# Altium schematic symbol library Inductor.SchLib: 326 symbols (part 3 of 7)
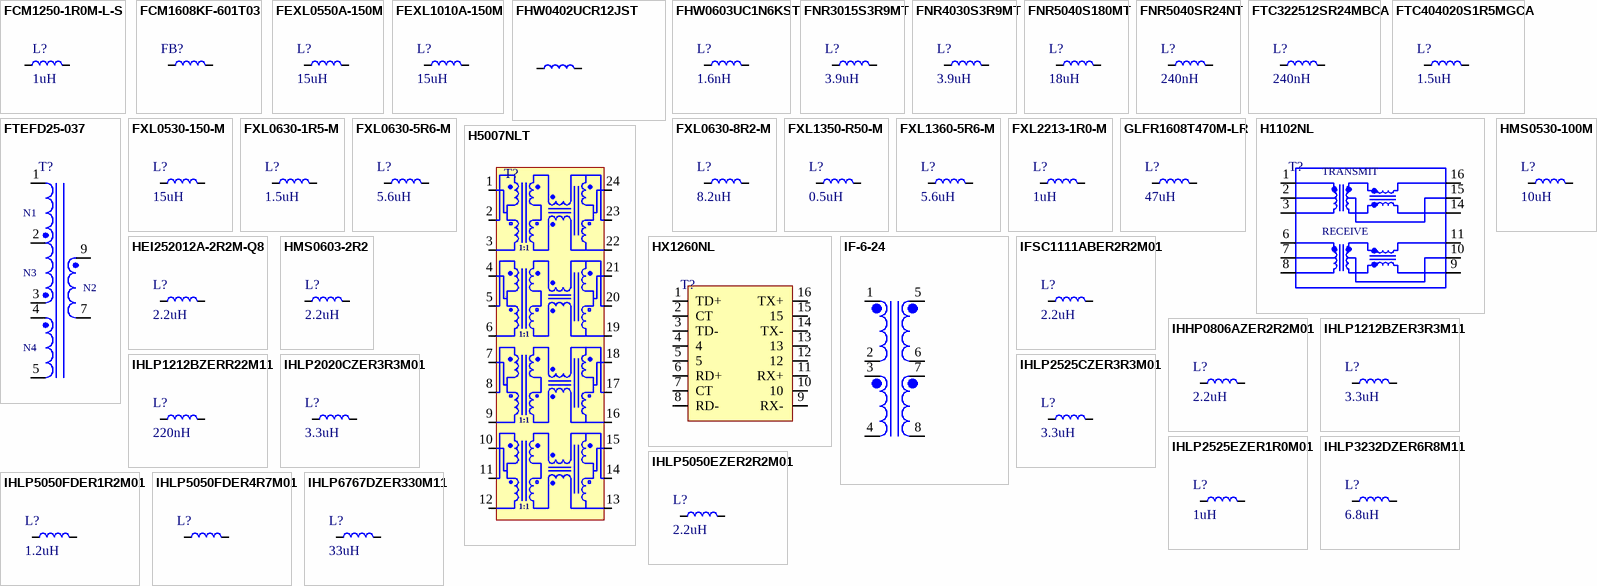
[diagram p10: symbols FCM1250-1R0M-L-S to IHLP6767DZER330M11]

## IHLP2020CZER3R3M01
designator L?, comment 3.3uH
FIXED IND 3.3UH 5A 54.7 MOHM SMD; Manufacturer: Vishay Dale; Manufacturer Part Number: IHLP2020CZER3R3M01; Item Type: Inductor; Supplier: Mouser; Supplier Part Number: 70-IHLP2020CZER3R3M0; RoHS: Yes; Category: Fixed Inductors; Stock: 17321; Pricing: 1=1.24, 10=0.947, 50=0.947, 100=0.796, 1000=0.606, 10000=0.497 (USD); ComponentLink1URL: https://datasheet.ciiva.com/16390/lp20cz01-16390407.pdf?src-supplier=Future+Electronics; ComponentLink1Description: https://datasheet.ciiva.com/16390/lp20cz01-16390407.pdf?src-supplier=Future+Electronics; ComponentLink2URL: https://datasheet.ciiva.com/1051/lp20cz01-1051660.pdf?src-supplier=Digi-Key; ComponentLink2Description: https://datasheet.ciiva.com/1051/lp20cz01-1051660.pdf?src-supplier=Digi-Key; ComponentLink3URL: https://datasheet.ciiva.com/1051/lp20cz01-1051661.pdf?src-supplier=Digi-Key; ComponentLink3Description: https://datasheet.ciiva.com/1051/lp20cz01-1051661.pdf?src-supplier=Digi-Key; ComponentLink4URL: https://datasheet.ciiva.com/1051/lp20cz01-1051662.pdf?src-supplier=Digi-Key; ComponentLink4Description: https://datasheet.ciiva.com/1051/lp20cz01-1051662.pdf?src-supplier=Digi-Key; ComponentLink5URL: https://datasheet.ciiva.com/8494/lp20cz01-8494984.pdf?src-supplier=Avnet; ComponentLink5Description: https://datasheet.ciiva.com/8494/lp20cz01-8494984.pdf?src-supplier=Avnet; LCSC Part Number: C553993
footprint IHLP2020CZER3R3M01
pins: 1, 2

## IHLP2525CZER3R3M01
designator L?, comment 3.3uH
6A 3.3uH ±20% 13.5A SMD,6.5x6.9mm Power Inductors ROHS; Manufacturer: Vishay Intertech; Manufacturer Part Number: IHLP2525CZER3R3M01; Package: SMD,6.5x6.9mm; LCSC Part Number: C506574; Item Type: Inductor; ComponentLink1Description: LCSC; ComponentLink1URL: https://www.lcsc.com/product-detail/Power-Inductors_Vishay-Intertech-IHLP2525CZER3R3M01_C506574.html
footprint IHLP2525CZER3R3M01
pins: 1, 2

## IHLP2525EZER1R0M01
designator L?, comment 1uH
FIXED IND 1UH 13A 6.5 MOHM SMD; Manufacturer: Vishay Dale; Manufacturer Part Number: IHLP2525EZER1R0M01; Core Material: Ferrite,Metal,Composite; Inductance Tolerance: 20%; Shielding: Shielded; Self Resonant Frequency: 1MHz; Saturation Current: 15A; DC Resistance (DCR): 6.5mR; Test Frequency: 100kHz; Item Type: Inductor; Supplier 1: Mouser; RoHS: Yes; Category: Fixed Inductors; Stock 1: 13861; Pricing 1: 1=1.91000, 10=1.63000, 50=1.63000, 100=1.27000, 1000=1.01000, 10000=0.97700 (USD); Mounting Technology: Surface Mount; Case/Package: 2525; Pins: 2525; Case Code (Metric): 6363; Case Code (Imperial): 2525; Contact Plating: Tin; Min Operating Temperature: -55°C; Max Operating Temperature: 125°C; Tolerance: 20%; Packaging: Tape and Reel; Package Quantity: 500; Value: 1uH; Current Rating: 13A; Max DC Current: 15A; Termination: SMD/SMT; RMS Current (Irms): 13A; Series: IHLP-2525EZ-01; Max Current Rating: 13A; Length: 6.86mm; Width: 6.47mm; Height: 5mm; Height - Seated (Max): 0.197inch; Depth: 6.72mm; Radiation Hardening: No; Military Standard: Not; Lead Free: Lead Free; RoHS Compliant: Yes; ComponentLink1URL: https://datasheet.ciiva.com/3866/ihlp25ez-3866198.pdf?src-supplier=Arrow+Electronics; ComponentLink1Description: https://datasheet.ciiva.com/3866/ihlp25ez-3866198.pdf?src-supplier=Arrow+Electronics; ComponentLink2URL: https://datasheet.ciiva.com/16367/ihlp2525ezer1r0m01-16367629.pdf?src-supplier=Future+Electronics; ComponentLink2Description: https://datasheet.ciiva.com/16367/ihlp2525ezer1r0m01-16367629.pdf?src-supplier=Future+Electronics; ComponentLink3URL: https://datasheet.ciiva.com/11798/0900766b8102c936-11798393.pdf?src-supplier=Rs; ComponentLink3Description: https://datasheet.ciiva.com/11798/0900766b8102c936-11798393.pdf?src-supplier=Rs; ComponentLink4URL: https://datasheet.ciiva.com/8017/425624-8017274.pdf?src-supplier=Element14; ComponentLink4Description: https://datasheet.ciiva.com/8017/425624-8017274.pdf?src-supplier=Element14; ComponentLink5URL: https://datasheet.ciiva.com/22694/425624-22694494.pdf?src-supplier=Element14; ComponentLink5Description: https://datasheet.ciiva.com/22694/425624-22694494.pdf?src-supplier=Element14; Supplier Part Number 1: 70-IHLP2525EZER1R0M1; LCSC Part Number: C845036
footprint IHLP2525EZER1R0M01
pins: 1, 2

## IHLP3232DZER6R8M11
designator L?, comment 6.8uH
FIXED IND 6.8UH 7A 33.4 MOHM SMD; Manufacturer: Vishay Dale; Manufacturer Part Number: IHLP3232DZER6R8M11; Item Type: Inductor; Core Material: Ferrite; Inductance Tolerance: 20%; Self Resonant Frequency: 13MHz; Shielding: Shielded; Saturation Current: 6.7A; DC Resistance (DCR): 33.4mR; Test Frequency: 100kHz; Supplier: Mouser; LCSC Part Number: C845060; RoHS: Yes; Stock: 8806; Pricing: 1=1.31, 10=0.984, 50=0.984, 100=0.752, 1000=0.557, 10000=0.521 (USD); Mounting Technology: Surface Mount; Case/Package: 3232; Pins: 2; Min Operating Temperature: -55°C; Max Operating Temperature: 125°C; Package Quantity: 500; Packaging: Tape and Reel; Tolerance: 20%; Current Rating: 7A; Value: 6.8uH; Max DC Current: 6.7A; Termination: SMD/SMT; RMS Current (Irms): 7A; Series: IHLP-3232DZ-11; Max Current Rating: 7A; Length: 0.34inch; Width: 0.322inch; Height: 4mm; Height - Seated (Max): 0.157inch; Depth: 8.94mm; Radiation Hardening: No; Military Standard: Not; Lead Free: Lead Free; RoHS Compliant: Yes; Reach SVHC Compliant: Unknown; ComponentLink1URL: https://datasheet.ciiva.com/5763/ihlp3232dz11-5763504.pdf?src-supplier=Farnell; ComponentLink1Description: https://datasheet.ciiva.com/5763/ihlp3232dz11-5763504.pdf?src-supplier=Farnell; ComponentLink2URL: https://datasheet.ciiva.com/1058/ihlp-3232dz-11-1058078.pdf?src-supplier=Digikey; ComponentLink2Description: https://datasheet.ciiva.com/1058/ihlp-3232dz-11-1058078.pdf?src-supplier=Digikey; ComponentLink3URL: https://datasheet.ciiva.com/1058/ihlp-3232dz-11-1058077.pdf?src-supplier=Digikey; ComponentLink3Description: https://datasheet.ciiva.com/1058/ihlp-3232dz-11-1058077.pdf?src-supplier=Digikey; ComponentLink4URL: https://datasheet.ciiva.com/1058/ihlp-3232dz-11-1058079.pdf?src-supplier=Digikey; ComponentLink4Description: https://datasheet.ciiva.com/1058/ihlp-3232dz-11-1058079.pdf?src-supplier=Digikey; ComponentLink5URL: https://datasheet.ciiva.com/8495/ihlp3232dz11-8495151.pdf?src-supplier=Avnet; ComponentLink5Description: https://datasheet.ciiva.com/8495/ihlp3232dz11-8495151.pdf?src-supplier=Avnet; ComponentLink6URL: https://datasheet.ciiva.com/8017/ihlp3232dz11-8017326.pdf?src-supplier=Element14; ComponentLink6Description: https://datasheet.ciiva.com/8017/ihlp3232dz11-8017326.pdf?src-supplier=Element14
footprint IHLP3232DZER6R8M11
pins: 1, 2

## IHLP5050EZER2R2M01
designator L?, comment 2.2uH
FIXED IND 2.2UH 20A 5.5 MOHM SMD; Manufacturer: Vishay Dale; Manufacturer Part Number: IHLP5050EZER2R2M01; Item Type: Inductors; Supplier: Future Electronics; LCSC Part Number: C2041476; RoHS: Yes; Stock: 500; Pricing: 250=0.935, 500=0.915, 1000=0.89, 1250=0.885, 3750=0.84 (USD); ComponentLink1URL: https://datasheet.ciiva.com/15160/getdatasheetpartid-74582-15160241.pdf?src-supplier=Verical; ComponentLink1Description: https://datasheet.ciiva.com/15160/getdatasheetpartid-74582-15160241.pdf?src-supplier=Verical; ComponentLink2URL: https://datasheet.ciiva.com/3082/ih50ez01-3082033.pdf?src-supplier=Avnet; ComponentLink2Description: https://datasheet.ciiva.com/3082/ih50ez01-3082033.pdf?src-supplier=Avnet; ComponentLink3URL: https://datasheet.ciiva.com/8017/425636-8017385.pdf?src-supplier=Element14; ComponentLink3Description: https://datasheet.ciiva.com/8017/425636-8017385.pdf?src-supplier=Element14
footprint IHLP5050EZER2R2M01
pins: 1, 2

## IHLP5050FDER1R2M01
designator L?, comment 1.2uH
FIXED IND 1.2UH 30A 2.5 MOHM SMD; Manufacturer: Vishay; Manufacturer Part Number: IHLP5050FDER1R2M01; Item Type: Inductor; Supplier: Digikey; LCSC Part Number: C2043370; RoHS: Yes; Stock: 366; Pricing: 1=2.26, 10=1.924, 25=1.7728, 50=1.5844, 100=1.3203 (USD); ComponentLink1URL: https://datasheet.ciiva.com/8017/54939-8017415.pdf?src-supplier=Element14; ComponentLink1Description: https://datasheet.ciiva.com/8017/54939-8017415.pdf?src-supplier=Element14; ComponentLink2URL: https://datasheet.ciiva.com/8496/lp50fd01-8496415.pdf?src-supplier=Avnet; ComponentLink2Description: https://datasheet.ciiva.com/8496/lp50fd01-8496415.pdf?src-supplier=Avnet
footprint IHLP5050FDER1R2M01
pins: 1, 2

## IHLP5050FDER4R7M01
designator L?
Inductor Power Shielded Wirewound 4.7uH 20% 100KHz Powdered Iron 13.5A 8.7mOhm DCR 5050 T/R; Manufacturer: Vishay Dale; Manufacturer Part Number: IHLP5050FDER4R7M01; Core Material: Metal,Composite,Ferrite; Self Resonant Frequency: 5MHz; Saturation Current: 32A; DC Resistance (DCR): 8.7mR; Supplier 1: Mouser; RoHS: Yes; Category: Fixed Inductors; Stock 1: 7872; Pricing 1: 1=2.51000, 10=1.81000, 50=1.81000, 100=1.38000, 1000=1.22000, 10000=1.14000 (USD); Mount: Surface Mount; Case/Package: 5050; Number of Pins: 5050; Contact Plating: Tin; Min Operating Temperature: -55°C; Max Operating Temperature: 125°C; Tolerance: 20%; Shielding: Shielded; Packaging: Tape and Reel; Package Quantity: 250; Inductance Tolerance: 20%; Inductance: 4.7uH; Current Rating: 13.5A; Max DC Current: 32A; Termination: SMD/SMT; Test Frequency: 100kHz; RMS Current (Irms): 13.5A; Series: IHLP-5050FD-01; Rated Current-Max: 13.5A; Length: 13.2mm; Width: 12.9mm; Height: 6.5mm; Height - Seated (Max): 0.256inch; Depth: 12.9mm; Radiation Hardening: No; Military Standard: Not; Lead Free: Lead Free; RoHS Compliant: Yes; ComponentLink1URL: https://datasheet.ciiva.com/11800/0900766b80926ea3-11800050.pdf?src-supplier=Rs; ComponentLink1Description: https://datasheet.ciiva.com/11800/0900766b80926ea3-11800050.pdf?src-supplier=Rs; ComponentLink2URL: https://datasheet.ciiva.com/3082/lp50fd01-3082044.pdf?src-supplier=Avnet; ComponentLink2Description: https://datasheet.ciiva.com/3082/lp50fd01-3082044.pdf?src-supplier=Avnet; ComponentLink3URL: https://datasheet.ciiva.com/8017/54939-8017420.pdf?src-supplier=Element14; ComponentLink3Description: https://datasheet.ciiva.com/8017/54939-8017420.pdf?src-supplier=Element14; LCSC Part Number: C845100; Item Type: Inductor; ComponentLink4Description: LCSC; ComponentLink4URL: https://www.lcsc.com/product-detail/Power-Inductors_Vishay-Intertech-IHLP5050FDER4R7M01_C845100.html
footprint IHLP5050FDER4R7M01.
pins: 1, 2

## IHLP6767DZER330M11
designator L?, comment 33uH
FIXED IND 33UH 6.5A 70.84MOHM SM; Manufacturer: Vishay Dale; Manufacturer Part Number: IHLP6767DZER330M11; Item Type: Fixed Inductors; Supplier: Digikey; LCSC Part Number: C1329381; RoHS: Yes; Stock: 3185; Pricing: 1=2.87, 10=2.362, 100=1.9423 (USD); ComponentLink1URL: https://datasheet.ciiva.com/1052/ihlp-6767dz-11-1052691.pdf?src-supplier=Digikey; ComponentLink1Description: https://datasheet.ciiva.com/1052/ihlp-6767dz-11-1052691.pdf?src-supplier=Digikey; ComponentLink2URL: https://datasheet.ciiva.com/1052/ihlp-6767dz-11-1052692.pdf?src-supplier=Digikey; ComponentLink2Description: https://datasheet.ciiva.com/1052/ihlp-6767dz-11-1052692.pdf?src-supplier=Digikey; ComponentLink3URL: https://datasheet.ciiva.com/1052/ihlp-6767dz-11-1052693.pdf?src-supplier=Digikey; ComponentLink3Description: https://datasheet.ciiva.com/1052/ihlp-6767dz-11-1052693.pdf?src-supplier=Digikey; ComponentLink4URL: https://datasheet.ciiva.com/8494/lp67dz11-8494894.pdf?src-supplier=Avnet; ComponentLink4Description: https://datasheet.ciiva.com/8494/lp67dz11-8494894.pdf?src-supplier=Avnet; ComponentLink5URL: https://datasheet.ciiva.com/7290/1836116-7290263.pdf?src-supplier=Newark; ComponentLink5Description: https://datasheet.ciiva.com/7290/1836116-7290263.pdf?src-supplier=Newark; ComponentLink6URL: https://datasheet.ciiva.com/8017/lp67dz11-8017653.pdf?src-supplier=Element14; ComponentLink6Description: https://datasheet.ciiva.com/8017/lp67dz11-8017653.pdf?src-supplier=Element14
footprint IHLP6767DZER330M11
pins: 1, 2

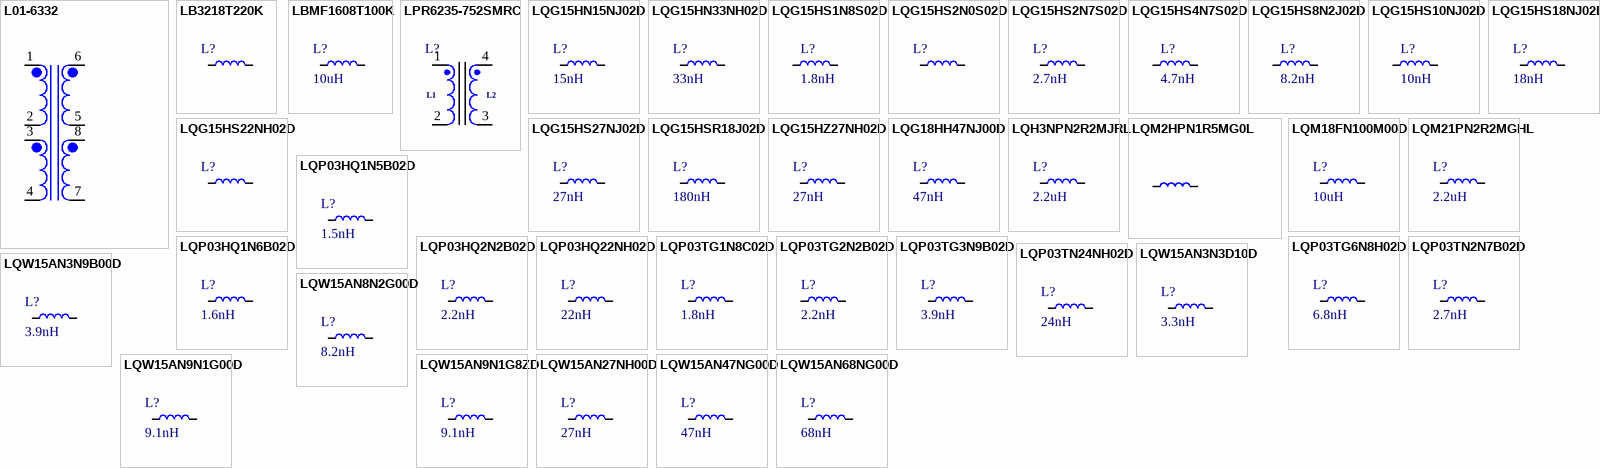
[diagram p3: symbols L01-6332 to LQW15AN68NG00D]

## L01-6332
designator T?
PWR XFMR TORO 7VA TH; Item Type: Transformer; Max Output current: 292mA; Primary Winding(s): Dual; Supplier: Digi-Key; Supplier Part Number: TE2240-ND; RoHS: Yes; Category: Transformers; Stock: 88; Pricing: 1=18.39, 24=16.22583, 48=14.06229, 96=13.52135 (USD); Mounting Technology: Through Hole; Weight: 0.384lb; Termination: PC Pin; Secondary Winding(s): Dual; Series: L01; Length: 49.7mm; Width: 49.7mm; Height - Seated (Max): 23.1mm; ComponentLink2URL: http://www.amgistoroids.com/assets/files/L01%20Series%2050%2060%20Hz%20PC%20Mount%20Toroidal%20Transformers.pdf?r=false&src-supplier=Digi-Key; ComponentLink2Description: http://www.amgistoroids.com/assets/files/L01%20Series%2050%2060%20Hz%20PC%20Mount%20Toroidal%20Transformers.pdf?r=false&src-supplier=Digi-Key
footprint L01-6332
pins: 1, 2, 3, 4, 5, 6, 7, 8

## LB3218T220K
designator L?
FIXED IND 22UH 255MA 490MOHM SMD; Manufacturer: Taiyo Yuden; Manufacturer Part Number: LB3218T220K; Core Material: Ferrite; Tolerance: 10%; Self Resonant Frequency: 19MHz; DC Resistance (DCR): 490mR; Test Frequency: 2.52MHz; Shielding: Unshielded; Item Type: Inductor; Supplier 1: Avnet; RoHS: Yes; Category: Fixed Inductors; Stock 1: 62; Pricing 1: 1=0.08700 (USD); Mounting Technology: Surface Mount; Case/Package: 1207; Pins: 2; Case Code (Metric): 3218; Case Code (Imperial): 1207; Min Operating Temperature: -40°C; Max Operating Temperature: 105°C; Packaging: Tape and Reel; Value: 22uH; Termination: SMD/SMT; Package Quantity: 2000; Current Rating: 255mA; Resistor Type: Wirewound; Max DC Current: 255mA; DC Current: 255mA; Series: LB; Length: 3.2mm; Width: 0.071inch; Height: 1.8mm; Height - Seated (Max): 0.08inch; Depth: 2mm; Radiation Hardening: No; RoHS Compliant: Yes; Military Standard: Not; Lead Free: Lead Free; Halogen Free: Halogen Free; ComponentLink1URL: https://datasheet.ciiva.com/1039/lb3218t220k-ss-1039280.pdf?src-supplier=Digi-Key; ComponentLink1Description: https://datasheet.ciiva.com/1039/lb3218t220k-ss-1039280.pdf?src-supplier=Digi-Key; ComponentLink2URL: https://datasheet.ciiva.com/8504/lb3218t220k-ss-8504739.pdf?src-supplier=Avnet; ComponentLink2Description: https://datasheet.ciiva.com/8504/lb3218t220k-ss-8504739.pdf?src-supplier=Avnet; ComponentLink3URL: https://datasheet.ciiva.com/26872/getdatasheetpartid-637493-26872233.pdf?src-supplier=Verical; ComponentLink3Description: https://datasheet.ciiva.com/26872/getdatasheetpartid-637493-26872233.pdf?src-supplier=Verical; ComponentLink4URL: https://datasheet.ciiva.com/15986/400lb3218t220k-15986619.pdf?src-supplier=Onlinecomponents.com; ComponentLink4Description: https://datasheet.ciiva.com/15986/400lb3218t220k-15986619.pdf?src-supplier=Onlinecomponents.com; ComponentLink5URL: https://datasheet.ciiva.com/25607/0900766b810b3abd-25607960.pdf?src-supplier=Rs; ComponentLink5Description: https://datasheet.ciiva.com/25607/0900766b810b3abd-25607960.pdf?src-supplier=Rs; Supplier Part Number 1: 24T3294; LCSC Part Number: C223400
footprint IND-3218
pins: 1, 2

## LBMF1608T100K
designator L?, comment 10uH
FIXED IND 10UH 80MA 360 MOHM SMD; Manufacturer: Taiyo Yuden; Manufacturer Part Number: LBMF1608T100K; Item Type: Inductors; Core Material: Ferrite; Self Resonant Frequency: 32MHz; Tolerance: 10%; Shielding: Unshielded; Test Frequency: 2.52MHz; DC Resistance (DCR): 360mR; ESR: 468mR; Supplier: Digikey; LCSC Part Number: C87216; RoHS: Yes; Stock: 2726337; Pricing: 1=0.13, 10=0.103, 25=0.0936, 50=0.0866, 100=0.0802, 250=0.07256, 500=0.06724, 1000=0.0623 (USD); Mounting Technology: Surface Mount; Case/Package: 0603; Weight: 7.1E-05oz; Case Code (Metric): 1608; Case Code (Imperial): 0603; Min Operating Temperature: -40°C; Max Operating Temperature: 105°C; Packaging: Tape and Reel; Value: 10uH; Max DC Current: 80mA; Termination: SMD/SMT; Inductance Tolerance: 10%; DC Current: 80mA; Series: LB, MF Type; RMS Current (Irms): 80mA; Length: 1.6mm; Width: 0.8mm; Height: 0.35mm; Lead Pitch: 0.7mm; Depth: 0.9mm; Radiation Hardening: No; Military Standard: Not; RoHS Compliant: Yes; Reach SVHC Compliant: Unknown; ComponentLink1URL: https://datasheet.ciiva.com/26872/getdatasheetpartid-637440-26872437.pdf?src-supplier=Verical; ComponentLink1Description: https://datasheet.ciiva.com/26872/getdatasheetpartid-637440-26872437.pdf?src-supplier=Verical; ComponentLink2URL: https://datasheet.ciiva.com/15986/610lbmf1608t100k-15986589.pdf?src-supplier=Onlinecomponents.com; ComponentLink2Description: https://datasheet.ciiva.com/15986/610lbmf1608t100k-15986589.pdf?src-supplier=Onlinecomponents.com; ComponentLink3URL: https://datasheet.ciiva.com/1040/lbmf1608t100k-ss-1040360.pdf?src-supplier=Digikey; ComponentLink3Description: https://datasheet.ciiva.com/1040/lbmf1608t100k-ss-1040360.pdf?src-supplier=Digikey; ComponentLink4URL: https://datasheet.ciiva.com/8504/lbmf1608t100k-ss-8504740.pdf?src-supplier=Avnet; ComponentLink4Description: https://datasheet.ciiva.com/8504/lbmf1608t100k-ss-8504740.pdf?src-supplier=Avnet; ComponentLink5URL: https://datasheet.ciiva.com/46395/1497259-46395174.pdf?src-supplier=Element14; ComponentLink5Description: https://datasheet.ciiva.com/46395/1497259-46395174.pdf?src-supplier=Element14
footprint IND-0603 (1608 Metric) (0.063" L x 0.032" W (1.60mm x 0.80mm))
pins: 1, 2

## LPR6235-752SMRC
designator L?
Coupled Inductors 7.5uH 75% 1.6A 316 Ohms; Manufacturer: Coilcraft; Manufacturer Part Number: LPR6235-752SMRC; Core Material: Ferrite; Supplier: Mouser; Supplier Part Number: 994-LPR6235-752SMRC; RoHS: Yes; Item Type: Inductors; Stock: 348; Pricing: 1=2.91, 10=2.48, 50=2.28, 100=1.7, 1000=1.56, 10000=1.25 (USD); Case/Package: 100; Min Operating Temperature: -40°C; Max Operating Temperature: 85°C; Packaging: Tape and Reel; Termination: SMD/SMT; Max DC Current: 1.6A; Package Quantity: 350; Inductance - Parallel: 7.5uH; Series: LPR6235; Length: 6mm; Width: 6mm; Height: 3.5mm; RoHS Compliant: Yes; ComponentLink1URL: http://www.mouser.com/ds/2/597/Coilcraft_lpr6235-491792.pdf?src-supplier=Mouser; ComponentLink1Description: http://www.mouser.com/ds/2/597/Coilcraft_lpr6235-491792.pdf?src-supplier=Mouser
footprint LPR6235-752SMRC
pins: 1, 2, 3, 4
text: L1; L2

## LQG15HN15NJ02D
designator L?, comment 15nH
FIXED IND 15NH 400MA 0.45OHM SMD; Manufacturer: Murata; Manufacturer Part Number: LQG15HN15NJ02D; Item Type: Inductor; Core Material: Air; Current Rating: 300mA; Tolerance: 5%; Q Factor: 8; Self Resonant Frequency: 2.3GHz; Shielding: Unshielded; DC Resistance (DCR): 460mR; Test Frequency: 100MHz; ESR: 450mR; Supplier: Mouser; LCSC Part Number: C97979; RoHS: Yes; Stock: 45308; Pricing: 1=0.1, 10=0.037, 50=0.037, 100=0.029, 1000=0.022, 10000=0.018 (USD); Mounting Technology: Surface Mount; Case/Package: 0402; Case Code (Metric): 1005; Case Code (Imperial): 0402; Min Operating Temperature: -55°C; Max Operating Temperature: 125°C; Packaging: Tape and Reel; Package Quantity: 1; Termination: SMD/SMT; Series: LQG15HS; Inductance Tolerance: 5%; Value: 15nH; Max DC Current: 300mA; DC Current: 300mA; Max Current Rating: 300mA; Length: 0.039inch; Width: 0.02inch; Height: 0.5mm; Height - Seated (Max): 0.022inch; Depth: 0.55mm; Reach SVHC Compliant: No; RoHS Compliant: Yes; Military Standard: Not; ComponentLink1URL: https://datasheet.ciiva.com/11801/0900766b80f10808-11801397.pdf?src-supplier=Rs; ComponentLink1Description: https://datasheet.ciiva.com/11801/0900766b80f10808-11801397.pdf?src-supplier=Rs; ComponentLink2URL: https://datasheet.ciiva.com/8002/66026-8002488.pdf?src-supplier=Element14; ComponentLink2Description: https://datasheet.ciiva.com/8002/66026-8002488.pdf?src-supplier=Element14; ComponentLink3URL: https://datasheet.ciiva.com/29696/l0075s0083lqg15hn-29696702.pdf?src-supplier=Digikey; ComponentLink3Description: https://datasheet.ciiva.com/29696/l0075s0083lqg15hn-29696702.pdf?src-supplier=Digikey; ComponentLink4URL: https://datasheet.ciiva.com/1063/l0075s0083lqg15hn-1063850.pdf?src-supplier=Digikey; ComponentLink4Description: https://datasheet.ciiva.com/1063/l0075s0083lqg15hn-1063850.pdf?src-supplier=Digikey; ComponentLink5URL: https://datasheet.ciiva.com/29696/l0075s0083lqg15hn-29696703.pdf?src-supplier=Digikey; ComponentLink5Description: https://datasheet.ciiva.com/29696/l0075s0083lqg15hn-29696703.pdf?src-supplier=Digikey
footprint IND-0402
pins: 1, 2

## LQG15HN33NH02D
designator L?, comment 33nH
300mA 33nH ±3% 670mΩ 0402 Inductors (SMD) ROHS; Manufacturer: Murata Electronics; Manufacturer Part Number: LQG15HN33NH02D; Package: 0402; LCSC Part Number: C2044267; Item Type: Inductor; ComponentLink1Description: LCSC; ComponentLink1URL: https://www.lcsc.com/product-detail/Inductors-SMD_Murata-Electronics-LQG15HN33NH02D_C2044267.html
footprint IND-0402
pins: 1, 2

## LQG15HS1N8S02D
designator L?, comment 1.8nH
FIXED IND 1.8NH 950MA 100MOHM SM; Manufacturer: Murata; Manufacturer Part Number: LQG15HS1N8S02D; Item Type: Inductor; Supplier: Arrow Electronics; Supplier Part Number: LQG15HS1N8S02D; RoHS: Yes; Category: Fixed Inductors; Stock: 78648; Pricing: 10000=0.0177, 50000=0.017 (USD); ComponentLink1URL: https://datasheet.ciiva.com/11801/0900766b80f10809-11801404.pdf?src-supplier=Rs; ComponentLink1Description: https://datasheet.ciiva.com/11801/0900766b80f10809-11801404.pdf?src-supplier=Rs; ComponentLink2URL: https://datasheet.ciiva.com/4977/o05e-4977799.pdf?src-supplier=Mouser; ComponentLink2Description: https://datasheet.ciiva.com/4977/o05e-4977799.pdf?src-supplier=Mouser; ComponentLink3URL: https://datasheet.ciiva.com/8510/l0075s0083lqg15hs-8510837.pdf?src-supplier=Avnet; ComponentLink3Description: https://datasheet.ciiva.com/8510/l0075s0083lqg15hs-8510837.pdf?src-supplier=Avnet; ComponentLink4URL: https://datasheet.ciiva.com/6690/l0075s0083lqg15hs-6690759.pdf?src-supplier=Digikey; ComponentLink4Description: https://datasheet.ciiva.com/6690/l0075s0083lqg15hs-6690759.pdf?src-supplier=Digikey; ComponentLink5URL: https://datasheet.ciiva.com/6690/l0075s0083lqg15hs-6690762.pdf?src-supplier=Digikey; ComponentLink5Description: https://datasheet.ciiva.com/6690/l0075s0083lqg15hs-6690762.pdf?src-supplier=Digikey; ComponentLink6URL: https://datasheet.ciiva.com/6690/l0075s0083lqg15hs-6690763.pdf?src-supplier=Digikey; ComponentLink6Description: https://datasheet.ciiva.com/6690/l0075s0083lqg15hs-6690763.pdf?src-supplier=Digikey; LCSC Part Number: C77107
footprint IND-0402
pins: 1, 2

## LQG15HS2N0S02D
designator L?
FIXED IND 2NH 900MA 0.1OHM SMD; Manufacturer: Murata; Manufacturer Part Number: LQG15HS2N0S02D; Item Type: Fixed Inductors; Core Material: Air; Shielding: Unshielded; Self Resonant Frequency: 6GHz; Q Factor: 8; Current Rating: 300mA; Value: 0.3nH; DC Resistance (DCR): 100mR; Test Frequency: 100MHz; ESR: 90mR; Supplier: Mouser; LCSC Part Number: C18216; RoHS: Yes; Stock: 32391; Pricing: 1=0.1, 10=0.039, 50=0.039, 100=0.031, 1000=0.028, 10000=0.02 (USD); Case/Package: 0402; Pins: 2; Case Code (Metric): 1005; Case Code (Imperial): 0402; Min Operating Temperature: -55°C; Max Operating Temperature: 125°C; Packaging: Tape and Reel; Package Quantity: 1; Current: 300mA; Max DC Current: 300mA; Termination: SMD/SMT; DC Current: 300mA; Series: LQG15HS; RMS Current (Irms): 900mA; Length: 1mm; Width: 0.02inch; Height: 0.5mm; Height - Seated (Max): 0.022inch; Depth: 0.55mm; Military Standard: Not; Lead Free: Contains Lead; RoHS Compliant: Yes; ComponentLink1URL: https://datasheet.ciiva.com/11799/0900766b8090d685-11799128.pdf?src-supplier=Rs; ComponentLink1Description: https://datasheet.ciiva.com/11799/0900766b8090d685-11799128.pdf?src-supplier=Rs; ComponentLink2URL: https://datasheet.ciiva.com/6705/l0075s0083lqg15hs-6705246.pdf?src-supplier=Digikey; ComponentLink2Description: https://datasheet.ciiva.com/6705/l0075s0083lqg15hs-6705246.pdf?src-supplier=Digikey; ComponentLink3URL: https://datasheet.ciiva.com/6705/l0075s0083lqg15hs-6705245.pdf?src-supplier=Digikey; ComponentLink3Description: https://datasheet.ciiva.com/6705/l0075s0083lqg15hs-6705245.pdf?src-supplier=Digikey; ComponentLink4URL: https://datasheet.ciiva.com/6705/l0075s0083lqg15hs-6705247.pdf?src-supplier=Digikey; ComponentLink4Description: https://datasheet.ciiva.com/6705/l0075s0083lqg15hs-6705247.pdf?src-supplier=Digikey; ComponentLink5URL: https://datasheet.ciiva.com/8510/l0075s0083lqg15hs-8510843.pdf?src-supplier=Avnet; ComponentLink5Description: https://datasheet.ciiva.com/8510/l0075s0083lqg15hs-8510843.pdf?src-supplier=Avnet
footprint IND-0402
pins: 1, 2

## LQG15HS2N7S02D
designator L?, comment 2.7nH
FIXED IND 2.7NH 800MA 0.15OHM SM; Manufacturer: Murata; Manufacturer Part Number: LQG15HS2N7S02D; Item Type: Inductors; Core Material: Air; Q Factor: 8; Self Resonant Frequency: 6GHz; Current Rating: 300mA; Shielding: Unshielded; DC Resistance (DCR): 150mR; Test Frequency: 100MHz; ESR: 120mR; Supplier: Future Electronics; LCSC Part Number: C77108; RoHS: Yes; Stock: 490000; Pricing: 10000=0.0152, 20000=0.0149, 30000=0.0148, 50000=0.0146, 100000=0.0143 (USD); Mounting Technology: Surface Mount; Case/Package: 0402; Case Code (Metric): 1005; Case Code (Imperial): 0402; Min Operating Temperature: -55°C; Max Operating Temperature: 125°C; Packaging: Tape and Reel; Package Quantity: 1; Value: 2.7nH; Max DC Current: 300mA; Termination: SMD/SMT; DC Current: 300mA; Series: LQG15HS; Max Current Rating: 300mA; RMS Current (Irms): 800mA; Length: 1mm; Width: 0.02inch; Height: 0.5mm; Height - Seated (Max): 0.022inch; Depth: 0.55mm; Radiation Hardening: No; Military Standard: Not; Lead Free: Lead Free; RoHS Compliant: Yes; ComponentLink1URL: https://datasheet.ciiva.com/11801/0900766b8090d685-11801391.pdf?src-supplier=Rs; ComponentLink1Description: https://datasheet.ciiva.com/11801/0900766b8090d685-11801391.pdf?src-supplier=Rs; ComponentLink2URL: https://datasheet.ciiva.com/1038/l0075s0083lqg15hs-1038152.pdf?src-supplier=Digikey; ComponentLink2Description: https://datasheet.ciiva.com/1038/l0075s0083lqg15hs-1038152.pdf?src-supplier=Digikey; ComponentLink3URL: https://datasheet.ciiva.com/1038/l0075s0083lqg15hs-1038151.pdf?src-supplier=Digikey; ComponentLink3Description: https://datasheet.ciiva.com/1038/l0075s0083lqg15hs-1038151.pdf?src-supplier=Digikey; ComponentLink4URL: https://datasheet.ciiva.com/1038/l0075s0083lqg15hs-1038153.pdf?src-supplier=Digikey; ComponentLink4Description: https://datasheet.ciiva.com/1038/l0075s0083lqg15hs-1038153.pdf?src-supplier=Digikey; ComponentLink5URL: https://datasheet.ciiva.com/8510/l0075s0083lqg15hs-8510853.pdf?src-supplier=Avnet; ComponentLink5Description: https://datasheet.ciiva.com/8510/l0075s0083lqg15hs-8510853.pdf?src-supplier=Avnet
footprint IND-0402
pins: 1, 2

## LQG15HS4N7S02D
designator L?, comment 4.7nH
FIXED IND 4.7NH 700MA 180MOHM SM; Manufacturer: Murata; Manufacturer Part Number: LQG15HS4N7S02D; Core Material: Air; Self Resonant Frequency: 6GHz; Q Factor: 8; Current Rating: 300mA; Shielding: Unshielded; DC Resistance (DCR): 180mR; Test Frequency: 100MHz; ESR: 160mR; Item Type: Inductor; Supplier: Avnet; Supplier Part Number: LQG15HS4N7S02D; RoHS: Yes; Category: Fixed Inductors; Stock: 30000; Pricing: 10000=0.02036, 20000=0.01989, 40000=0.01942 (USD); Mounting Technology: Surface Mount; Case/Package: 0402; Case Code (Metric): 1005; Case Code (Imperial): 0402; Min Operating Temperature: -55°C; Max Operating Temperature: 125°C; Package Quantity: 1; Packaging: Tape and Reel; Value: 4.7nH; Max DC Current: 300mA; Termination: SMD/SMT; DC Current: 300mA; Series: LQG15HS; Max Current Rating: 300mA; RMS Current (Irms): 700mA; Length: 1mm; Width: 0.02inch; Height: 0.5mm; Height - Seated (Max): 0.022inch; Depth: 0.55mm; Military Standard: Not; Lead Free: Lead Free; RoHS Compliant: Yes; ComponentLink1URL: https://datasheet.ciiva.com/11799/0900766b8090d685-11799034.pdf?src-supplier=Rs; ComponentLink1Description: https://datasheet.ciiva.com/11799/0900766b8090d685-11799034.pdf?src-supplier=Rs; ComponentLink2URL: https://datasheet.ciiva.com/1038/l0075s0083lqg15hs-1038121.pdf?src-supplier=Digikey; ComponentLink2Description: https://datasheet.ciiva.com/1038/l0075s0083lqg15hs-1038121.pdf?src-supplier=Digikey; ComponentLink3URL: https://datasheet.ciiva.com/1038/l0075s0083lqg15hs-1038123.pdf?src-supplier=Digikey; ComponentLink3Description: https://datasheet.ciiva.com/1038/l0075s0083lqg15hs-1038123.pdf?src-supplier=Digikey; ComponentLink4URL: https://datasheet.ciiva.com/8509/l0075s0083lqg15hs-8509718.pdf?src-supplier=Avnet; ComponentLink4Description: https://datasheet.ciiva.com/8509/l0075s0083lqg15hs-8509718.pdf?src-supplier=Avnet; ComponentLink5URL: https://datasheet.ciiva.com/1038/l0075s0083lqg15hs-1038122.pdf?src-supplier=Digikey; ComponentLink5Description: https://datasheet.ciiva.com/1038/l0075s0083lqg15hs-1038122.pdf?src-supplier=Digikey; LCSC Part Number: C86065
footprint IND-0402
pins: 1, 2

## LQG15HS8N2J02D
designator L?, comment 8.2nH
FIXED IND 8.2NH 550MA 240MOHM SM; Manufacturer: Murata; Manufacturer Part Number: LQG15HS8N2J02D; Core Material: Air; Tolerance: 5%; DC Resistance (DCR): 240mR; Max DC Current: 300mA; Shielding: Unshielded; Q Factor: 8; Self Resonant Frequency: 3.7GHz; Test Frequency: 100MHz; Item Type: Inductor; Supplier: Mouser; Supplier Part Number: 81-LQG15HS8N2J02D; RoHS: Yes; Category: Fixed Inductors; Stock: 748; Pricing: 1=0.1, 10=0.037, 50=0.037, 100=0.029, 1000=0.022, 10000=0.018 (USD); Mounting Technology: Surface Mount; Case/Package: 0402; Case Code (Metric): 1005; Case Code (Imperial): 0402; Weight: 2.3E-05oz; Min Operating Temperature: -55°C; Max Operating Temperature: 125°C; Value: 8.2nH; Package Quantity: 1; Current Rating: 300mA; Packaging: Tape and Reel; Termination: SMD/SMT; DC Current: 300mA; Series: LQG15HS; Max Current Rating: 300mA; Length: 1mm; Width: 0.02inch; Height: 0.5mm; Height - Seated (Max): 0.022inch; Depth: 0.55mm; Military Standard: Not; Lead Free: Lead Free; RoHS Compliant: Yes; ComponentLink1URL: https://datasheet.ciiva.com/11799/0900766b8090d685-11799047.pdf?src-supplier=Rs; ComponentLink1Description: https://datasheet.ciiva.com/11799/0900766b8090d685-11799047.pdf?src-supplier=Rs; ComponentLink2URL: https://datasheet.ciiva.com/1038/l0075s0083lqg15hs-1038112.pdf?src-supplier=Digikey; ComponentLink2Description: https://datasheet.ciiva.com/1038/l0075s0083lqg15hs-1038112.pdf?src-supplier=Digikey; ComponentLink3URL: https://datasheet.ciiva.com/1038/l0075s0083lqg15hs-1038113.pdf?src-supplier=Digikey; ComponentLink3Description: https://datasheet.ciiva.com/1038/l0075s0083lqg15hs-1038113.pdf?src-supplier=Digikey; ComponentLink4URL: https://datasheet.ciiva.com/1038/l0075s0083lqg15hs-1038114.pdf?src-supplier=Digikey; ComponentLink4Description: https://datasheet.ciiva.com/1038/l0075s0083lqg15hs-1038114.pdf?src-supplier=Digikey; ComponentLink5URL: https://datasheet.ciiva.com/8510/l0075s0083lqg15hs-8510877.pdf?src-supplier=Avnet; ComponentLink5Description: https://datasheet.ciiva.com/8510/l0075s0083lqg15hs-8510877.pdf?src-supplier=Avnet; ComponentLink6URL: https://datasheet.ciiva.com/16208/l0075s0083lqg15hs-16208342.pdf?src-supplier=Future+Electronics; ComponentLink6Description: https://datasheet.ciiva.com/16208/l0075s0083lqg15hs-16208342.pdf?src-supplier=Future+Electronics; LCSC Part Number: C98003
footprint IND-0402
pins: 1, 2

## LQG15HS10NJ02D
designator L?, comment 10nH
FIXED IND 10NH 500MA 260MOHM SMD; Manufacturer: Murata; Manufacturer Part Number: LQG15HS10NJ02D; ESR: 260mR; Item Type: Inductor; Supplier: Rs; Supplier Part Number: 1248162P; RoHS: Yes; Category: Fixed Inductors; Stock: 5000; Pricing: 5000=0.015, 12500=0.014, 25000=0.012, 50000=0.011 (GBP); RMS Current (Irms): 500mA; ComponentLink1URL: https://datasheet.ciiva.com/11801/0900766b80f10809-11801401.pdf?src-supplier=Rs; ComponentLink1Description: https://datasheet.ciiva.com/11801/0900766b80f10809-11801401.pdf?src-supplier=Rs; ComponentLink2URL: https://datasheet.ciiva.com/1038/l0075s0083lqg15hs-1038118.pdf?src-supplier=Digikey; ComponentLink2Description: https://datasheet.ciiva.com/1038/l0075s0083lqg15hs-1038118.pdf?src-supplier=Digikey; ComponentLink3URL: https://datasheet.ciiva.com/1038/l0075s0083lqg15hs-1038119.pdf?src-supplier=Digikey; ComponentLink3Description: https://datasheet.ciiva.com/1038/l0075s0083lqg15hs-1038119.pdf?src-supplier=Digikey; ComponentLink4URL: https://datasheet.ciiva.com/1038/l0075s0083lqg15hs-1038120.pdf?src-supplier=Digikey; ComponentLink4Description: https://datasheet.ciiva.com/1038/l0075s0083lqg15hs-1038120.pdf?src-supplier=Digikey; ComponentLink5URL: https://datasheet.ciiva.com/8510/l0075s0083lqg15hs-8510813.pdf?src-supplier=Avnet; ComponentLink5Description: https://datasheet.ciiva.com/8510/l0075s0083lqg15hs-8510813.pdf?src-supplier=Avnet; LCSC Part Number: C77103
footprint IND-0402
pins: 1, 2

## LQG15HS18NJ02D
designator L?, comment 18nH
FIXED IND 18NH 400MA 360MOHM SMD; Manufacturer: Murata; Manufacturer Part Number: LQG15HS18NJ02D; Core Material: Air; Tolerance: 5%; Self Resonant Frequency: 2.2GHz; Q Factor: 8; Current Rating: 300mA; Shielding: Unshielded; DC Resistance (DCR): 360mR; Test Frequency: 100MHz; Item Type: Inductor; Supplier: Rs; Supplier Part Number: 7254910P; RoHS: Yes; Category: Fixed Inductors; Stock: 4990; Pricing: 100=0.065, 250=0.058, 500=0.049, 1000=0.042 (GBP); Mounting Technology: Surface Mount; Case/Package: 0402; Case Code (Metric): 1005; Case Code (Imperial): 0402; Weight: 2.3E-05oz; Min Operating Temperature: -55°C; Max Operating Temperature: 125°C; Packaging: Tape and Reel; Package Quantity: 1; Inductance Tolerance: 5%; Value: 18nH; Max DC Current: 300mA; Termination: SMD/SMT; DC Current: 300mA; Series: LQG15HS; Max Current Rating: 300mA; Length: 0.039inch; Width: 0.02inch; Height: 0.5mm; Height - Seated (Max): 0.022inch; Depth: 0.55mm; Reach SVHC Compliant: No; Military Standard: Not; Lead Free: Lead Free; RoHS Compliant: Yes; ComponentLink1URL: https://datasheet.ciiva.com/11801/0900766b80f10809-11801396.pdf?src-supplier=Rs; ComponentLink1Description: https://datasheet.ciiva.com/11801/0900766b80f10809-11801396.pdf?src-supplier=Rs; ComponentLink2URL: https://datasheet.ciiva.com/1038/l0075s0083lqg15hs-1038125.pdf?src-supplier=Digikey; ComponentLink2Description: https://datasheet.ciiva.com/1038/l0075s0083lqg15hs-1038125.pdf?src-supplier=Digikey; ComponentLink3URL: https://datasheet.ciiva.com/1038/l0075s0083lqg15hs-1038124.pdf?src-supplier=Digikey; ComponentLink3Description: https://datasheet.ciiva.com/1038/l0075s0083lqg15hs-1038124.pdf?src-supplier=Digikey; ComponentLink4URL: https://datasheet.ciiva.com/1038/l0075s0083lqg15hs-1038126.pdf?src-supplier=Digikey; ComponentLink4Description: https://datasheet.ciiva.com/1038/l0075s0083lqg15hs-1038126.pdf?src-supplier=Digikey; ComponentLink5URL: https://datasheet.ciiva.com/8510/l0075s0083lqg15hs-8510821.pdf?src-supplier=Avnet; ComponentLink5Description: https://datasheet.ciiva.com/8510/l0075s0083lqg15hs-8510821.pdf?src-supplier=Avnet; ComponentLink6URL: https://datasheet.ciiva.com/16444/l0075s0083lqg15hs-16444389.pdf?src-supplier=Future+Electronics; ComponentLink6Description: https://datasheet.ciiva.com/16444/l0075s0083lqg15hs-16444389.pdf?src-supplier=Future+Electronics; LCSC Part Number: C86060
footprint IND-0402
pins: 1, 2

## LQG15HS22NH02D
designator L?
FIXED IND 22NH 350MA 420MOHM SMD; Manufacturer: Murata; Manufacturer Part Number: LQG15HS22NH02D; Core Material: Air; Tolerance: 3%; Shielding: Unshielded; DC Resistance (DCR): 420mR; Self Resonant Frequency: 1.9GHz; Test Frequency: 100MHz; Item Type: Inductor; Supplier: Arrow Electronics; Supplier Part Number: LQG15HS22NH02D; RoHS: Yes; Category: Fixed Inductors; Stock: 2924; Pricing: 1=0.0948, 10=0.044, 25=0.0437, 100=0.0323, 250=0.032, 500=0.0317, 1000=0.019 (USD); Mounting Technology: Surface Mount; Case/Package: 0402; Min Operating Temperature: -55°C; Max Operating Temperature: 125°C; Series: LQG15; Value: 22nH; RoHS Compliant: Yes; LCSC Part Number: C2041459
footprint IND-0402
pins: 1, 2

## LQG15HS27NJ02D
designator L?, comment 27nH
FIXED IND 27NH 350MA 460MOHM SMD; Manufacturer: Murata; Manufacturer Part Number: LQG15HS27NJ02D; Core Material: Air; Current Rating: 300mA; Tolerance: 5%; Shielding: Unshielded; Self Resonant Frequency: 1.7GHz; Q Factor: 8; DC Resistance (DCR): 460mR; Test Frequency: 100MHz; Item Type: Inductor; Supplier: Rs; Supplier Part Number: 7254923P; RoHS: Yes; Category: Fixed Inductors; Stock: 29420; Pricing: 100=0.031, 250=0.027, 500=0.023, 1000=0.02 (GBP); Mounting Technology: Surface Mount; Case/Package: 0402; Case Code (Metric): 1005; Case Code (Imperial): 0402; Min Operating Temperature: -55°C; Max Operating Temperature: 125°C; Package Quantity: 1; Packaging: Tape and Reel; Inductance Tolerance: 5%; Value: 27nH; Max DC Current: 300mA; Termination: SMD/SMT; DC Current: 300mA; Series: LQG15HS; Max Current Rating: 300mA; Length: 1mm; Width: 0.02inch; Height: 0.5mm; Height - Seated (Max): 0.022inch; Depth: 0.55mm; Reach SVHC Compliant: No; Military Standard: Not; Lead Free: Lead Free; RoHS Compliant: Yes; ComponentLink1URL: https://datasheet.ciiva.com/11799/0900766b80f10809-11799242.pdf?src-supplier=Rs; ComponentLink1Description: https://datasheet.ciiva.com/11799/0900766b80f10809-11799242.pdf?src-supplier=Rs; ComponentLink2URL: https://datasheet.ciiva.com/1038/l0075s0083lqg15hs-1038146.pdf?src-supplier=Digikey; ComponentLink2Description: https://datasheet.ciiva.com/1038/l0075s0083lqg15hs-1038146.pdf?src-supplier=Digikey; ComponentLink3URL: https://datasheet.ciiva.com/1038/l0075s0083lqg15hs-1038145.pdf?src-supplier=Digikey; ComponentLink3Description: https://datasheet.ciiva.com/1038/l0075s0083lqg15hs-1038145.pdf?src-supplier=Digikey; ComponentLink4URL: https://datasheet.ciiva.com/1038/l0075s0083lqg15hs-1038147.pdf?src-supplier=Digikey; ComponentLink4Description: https://datasheet.ciiva.com/1038/l0075s0083lqg15hs-1038147.pdf?src-supplier=Digikey; ComponentLink5URL: https://datasheet.ciiva.com/3082/l0075s0083lqg15hs-3082179.pdf?src-supplier=Avnet; ComponentLink5Description: https://datasheet.ciiva.com/3082/l0075s0083lqg15hs-3082179.pdf?src-supplier=Avnet; ComponentLink6URL: https://datasheet.ciiva.com/16360/l0075s0083lqg15hs-16360143.pdf?src-supplier=Future+Electronics; ComponentLink6Description: https://datasheet.ciiva.com/16360/l0075s0083lqg15hs-16360143.pdf?src-supplier=Future+Electronics; LCSC Part Number: C12669
footprint IND-0402
pins: 1, 2

## LQG15HSR18J02D
designator L?, comment 180nH
FIXED IND 180NH 150MA 3.38OHM SM; Manufacturer: Murata; Manufacturer Part Number: LQG15HSR18J02D; Core Material: Air; Tolerance: 5%; DC Resistance (DCR): 3.38R; Max DC Current: 130mA; Self Resonant Frequency: 500MHz; Q Factor: 8; Shielding: Unshielded; Test Frequency: 100MHz; Item Type: Inductor; Supplier: Future Electronics; Supplier Part Number: 6065630; RoHS: Yes; Category: Fixed Inductors; Stock: 20000; Pricing: 10000=0.0094, 30000=0.0091, 50000=0.0089, 150000=0.0086, 250000=0.0083 (USD); Mounting Technology: Surface Mount; Case/Package: 0402; Case Code (Metric): 1005; Case Code (Imperial): 0402; Min Operating Temperature: -55°C; Max Operating Temperature: 125°C; Value: 180nH; Packaging: Tape and Reel; Package Quantity: 1; Current Rating: 130mA; Termination: SMD/SMT; DC Current: 130mA; Series: LQG15HS; Max Current Rating: 130mA; Length: 1mm; Width: 0.02inch; Height: 0.5mm; Height - Seated (Max): 0.022inch; Depth: 0.55mm; Military Standard: Not; Lead Free: Lead Free; RoHS Compliant: Yes; ComponentLink1URL: https://datasheet.ciiva.com/11799/0900766b8090d458-11799084.pdf?src-supplier=Rs; ComponentLink1Description: https://datasheet.ciiva.com/11799/0900766b8090d458-11799084.pdf?src-supplier=Rs; ComponentLink2URL: https://datasheet.ciiva.com/4976/o05e-4976364.pdf?src-supplier=Mouser; ComponentLink2Description: https://datasheet.ciiva.com/4976/o05e-4976364.pdf?src-supplier=Mouser; ComponentLink3URL: https://datasheet.ciiva.com/16456/l0075s0083lqg15hs-16456253.pdf?src-supplier=Future+Electronics; ComponentLink3Description: https://datasheet.ciiva.com/16456/l0075s0083lqg15hs-16456253.pdf?src-supplier=Future+Electronics; ComponentLink4URL: https://datasheet.ciiva.com/6690/l0075s0083lqg15hs-6690743.pdf?src-supplier=Digi-Key; ComponentLink4Description: https://datasheet.ciiva.com/6690/l0075s0083lqg15hs-6690743.pdf?src-supplier=Digi-Key; ComponentLink5URL: https://datasheet.ciiva.com/6690/l0075s0083lqg15hs-6690745.pdf?src-supplier=Digi-Key; ComponentLink5Description: https://datasheet.ciiva.com/6690/l0075s0083lqg15hs-6690745.pdf?src-supplier=Digi-Key; ComponentLink6URL: https://datasheet.ciiva.com/6690/l0075s0083lqg15hs-6690746.pdf?src-supplier=Digi-Key; ComponentLink6Description: https://datasheet.ciiva.com/6690/l0075s0083lqg15hs-6690746.pdf?src-supplier=Digi-Key; LCSC Part Number: C185484
footprint IND-0402
pins: 1, 2

## LQG15HZ27NH02D
designator L?, comment 27nH
FIXED IND 27NH 350MA 460MOHM SMD; Manufacturer: Murata; Manufacturer Part Number: LQG15HZ27NH02D; Core Material: Air; Tolerance: 3%; Shielding: Unshielded; DC Resistance (DCR): 460mR; Self Resonant Frequency: 1.7GHz; Test Frequency: 100MHz; Item Type: Inductor; Supplier: Mouser; Supplier Part Number: 81-LQG15HZ27NH02D; RoHS: Yes; Category: Fixed Inductors; Stock: 436; Pricing: 1=0.1, 10=0.068, 50=0.068, 100=0.047, 1000=0.03, 10000=0.026 (USD); Mounting Technology: Surface Mount; Case/Package: 0402; Case Code (Imperial): 0402; Case Code (Metric): 1005; Min Operating Temperature: -55°C; Max Operating Temperature: 125°C; Packaging: Cut Tape; Value: 27nH; Current Rating: 350mA; Series: LQG15; Ratings: AEC-Q200; RoHS Compliant: Yes; ComponentLink1URL: http://search.murata.co.jp/Ceramy/image/img/P02/JELF243B-9110.pdf?src-supplier=Digi-Key; ComponentLink1Description: http://search.murata.co.jp/Ceramy/image/img/P02/JELF243B-9110.pdf?src-supplier=Digi-Key; LCSC Part Number: C237452
footprint IND-0402
pins: 1, 2

## LQG18HH47NJ00D
designator L?, comment 47nH
FIXED IND 47NH 400MA 0.7OHM SMD; Manufacturer: Murata; Manufacturer Part Number: LQG18HH47NJ00D; Item Type: Inductors; Core Material: Air; DC Resistance (DCR): 700mR; Tolerance: 5%; Self Resonant Frequency: 900MHz; Test Frequency: 100MHz; Supplier: Mouser; LCSC Part Number: C524629; RoHS: Yes; Stock: 2276; Pricing: 1=0.23, 10=0.15, 50=0.15, 100=0.116, 1000=0.097, 10000=0.077 (USD); Mounting Technology: Surface Mount; Case/Package: 0603; Case Code (Imperial): 0603; Min Operating Temperature: -55°C; Max Operating Temperature: 125°C; Package Quantity: 4000; Packaging: Tape and Reel; Termination: SMD/SMT; Value: 47nH; Series: LQG18; RoHS Compliant: Yes; ComponentLink1URL: https://datasheet.ciiva.com/4981/o05e-4981638.pdf?src-supplier=Mouser; ComponentLink1Description: https://datasheet.ciiva.com/4981/o05e-4981638.pdf?src-supplier=Mouser
footprint IND-0603 (1608 Metric) (0.063" L x 0.032" W (1.60mm x 0.80mm))
pins: 1, 2

## LQH3NPN2R2MJRL
designator L?, comment 2.2uH
FIXED IND 2.2UH 980MA 81.6 MOHM; Manufacturer: Murata; Manufacturer Part Number: LQH3NPN2R2MJRL; Core Material: Ferrite; Saturation Current: 1.8A; Shielding: Shielded; DC Resistance (DCR): 81.6mR; Self Resonant Frequency: 45MHz; Test Frequency: 1MHz; Tolerance: 20%; Item Type: Inductor; Supplier 1: Arrow Electronics; RoHS: Yes; Category: Fixed Inductors; Stock 1: 1497; Pricing 1: 1=0.41670, 10=0.27560, 25=0.27280, 100=0.23380, 250=0.22710, 500=0.21570, 1000=0.17630 (USD); Mounting Technology: Surface Mount; Case/Package: 1212; Case Code (Metric): 3030; Case Code (Imperial): 1212; Min Operating Temperature: -40°C; Max Operating Temperature: 105°C; Packaging: Tape and Reel; Resistor Type: Wirewound; Value: 2.2uH; Current Rating: 980mA; Length: 0.118inch; Width: 0.118inch; Height - Seated (Max): 0.047inch; RoHS Compliant: Yes; ComponentLink1URL: http://www.murata.com/~/media/webrenewal/support/library/catalog/products/inductor/chip/o05e.ashx?src-supplier=Digi-Key; ComponentLink1Description: http://www.murata.com/~/media/webrenewal/support/library/catalog/products/inductor/chip/o05e.ashx?src-supplier=Digi-Key; ComponentLink2URL: http://search.murata.co.jp/Ceramy/image/img/P02/JELF243A-0114.pdf?src-supplier=Digi-Key; ComponentLink2Description: http://search.murata.co.jp/Ceramy/image/img/P02/JELF243A-0114.pdf?src-supplier=Digi-Key; Supplier Part Number 1: LQH3NPN2R2MJRL; LCSC Part Number: C341775
footprint LQH3NPN2R2MJRL
pins: 1, 2

## LQM2HPN1R5MG0L
designator L?, comment 1.5uH
Inductor Power Chip Shielded Multi-Layer 1.5uH 20% 1MHz Ferrite 1.5A 0.088Ohm DCR 1008 T/R; Manufacturer: Murata Electronics; Manufacturer Part Number: LQM2HPN1R5MG0L; Self Resonant Frequency: 50MHz; DC Resistance (DCR): 88mR; Package: 1008; LCSC Part Number: C98034; Item Type: Inductor; ComponentLink1Description: LCSC; ComponentLink1URL: https://www.lcsc.com/product-detail/Inductors-SMD_Murata-Electronics-LQM2HPN1R5MG0L_C98034.html; Supplier: Digikey; Supplier Part Number: 490-5113-1-ND; RoHS: Yes; Category: Fixed Inductors; Stock: 55189; Pricing: 1=0.21, 10=0.171, 25=0.1576, 50=0.1444, 100=0.1274, 250=0.12344, 500=0.11032, 1000=0.0893 (USD); Mounting Technology: Surface Mount; Case/Package: 1008; Core Material: Ferrite; Case Code (Metric): 2520; Case Code (Imperial): 1008; Min Operating Temperature: -55°C; Max Operating Temperature: 125°C; Tolerance: 20%; Packaging: Tape and Reel; Shielding: Shielded; Package Quantity: 1; Current Rating: 1.5A; Value: 1.5uH; Test Frequency: 1MHz; Max DC Current: 1.5A; Termination: SMD/SMT; DC Current: 1.5A; Inductance Tolerance: 20%; Series: LQM2HP_G0; RMS Current (Irms): 1.5A; ESR: 88mR; Length: 2.5mm; Width: 0.079inch; Height: 1.2mm; Height - Seated (Max): 0.039inch; Depth: 2.2mm; Radiation Hardening: No; Military Standard: Not; Reach SVHC Compliant: No; Lead Free: Lead Free; RoHS Compliant: Yes; ComponentLink2URL: https://datasheet.ciiva.com/30490/0900766b812561d9-30490182.pdf?src-supplier=Rs; ComponentLink2Description: https://datasheet.ciiva.com/30490/0900766b812561d9-30490182.pdf?src-supplier=Rs; ComponentLink3URL: https://datasheet.ciiva.com/1042/l0075s0104lqm2hp-g0-1042938.pdf?src-supplier=Digikey; ComponentLink3Description: https://datasheet.ciiva.com/1042/l0075s0104lqm2hp-g0-1042938.pdf?src-supplier=Digikey; ComponentLink4URL: https://datasheet.ciiva.com/1042/l0075s0104lqm2hp-g0-1042937.pdf?src-supplier=Digikey; ComponentLink4Description: https://datasheet.ciiva.com/1042/l0075s0104lqm2hp-g0-1042937.pdf?src-supplier=Digikey; ComponentLink5URL: https://datasheet.ciiva.com/1042/l0075s0104lqm2hp-g0-1042939.pdf?src-supplier=Digikey; ComponentLink5Description: https://datasheet.ciiva.com/1042/l0075s0104lqm2hp-g0-1042939.pdf?src-supplier=Digikey; ComponentLink6URL: https://datasheet.ciiva.com/8510/l0075s0104lqm2hp-g0-8510490.pdf?src-supplier=Avnet; ComponentLink6Description: https://datasheet.ciiva.com/8510/l0075s0104lqm2hp-g0-8510490.pdf?src-supplier=Avnet
footprint IND-1008 (2520 Metric)
pins: 1, 2

## LQM18FN100M00D
designator L?, comment 10uH
FIXED IND 10UH 50MA 1.17 OHM SMD; Manufacturer: Murata; Manufacturer Part Number: LQM18FN100M00D; Core Material: Ferrite; Self Resonant Frequency: 30MHz; Shielding: Shielded; Tolerance: 20%; DC Resistance (DCR): 1.17R; Test Frequency: 1MHz; Item Type: Inductor; Supplier: Rs; Supplier Part Number: 7242696; RoHS: Yes; Category: Fixed Inductors; Stock: 525; Pricing: 25=0.11, 50=0.093, 500=0.082, 1000=0.071, 2500=0.066 (GBP); Mounting Technology: Surface Mount; Case/Package: 0603; Case Code (Metric): 1608; Case Code (Imperial): 0603; Min Operating Temperature: -55°C; Max Operating Temperature: 125°C; Packaging: Tape and Reel; Package Quantity: 4000; Current Rating: 50mA; Value: 10uH; Saturation Current: 50mA; Max DC Current: 50mA; Termination: SMD/SMT; DC Current: 50mA; Series: LQM18F; Length: 0.063inch; Width: 0.031inch; Height: 0.9mm; Height - Seated (Max): 0.035inch; Depth: 0.9mm; Military Standard: Not; Lead Free: Lead Free; RoHS Compliant: Yes; ComponentLink1URL: https://datasheet.ciiva.com/11799/0900766b80f15512-11799471.pdf?src-supplier=Rs; ComponentLink1Description: https://datasheet.ciiva.com/11799/0900766b80f15512-11799471.pdf?src-supplier=Rs; ComponentLink2URL: https://datasheet.ciiva.com/3865/286lqm18fn100m0023-3865365.pdf?src-supplier=Arrow+Electronics; ComponentLink2Description: https://datasheet.ciiva.com/3865/286lqm18fn100m0023-3865365.pdf?src-supplier=Arrow+Electronics; ComponentLink3URL: https://datasheet.ciiva.com/1039/l0075s0097lqm18f-1039418.pdf?src-supplier=Digi-Key; ComponentLink3Description: https://datasheet.ciiva.com/1039/l0075s0097lqm18f-1039418.pdf?src-supplier=Digi-Key; ComponentLink4URL: https://datasheet.ciiva.com/1039/l0075s0097lqm18f-1039417.pdf?src-supplier=Digi-Key; ComponentLink4Description: https://datasheet.ciiva.com/1039/l0075s0097lqm18f-1039417.pdf?src-supplier=Digi-Key; ComponentLink5URL: https://datasheet.ciiva.com/1039/l0075s0097lqm18f-1039419.pdf?src-supplier=Digi-Key; ComponentLink5Description: https://datasheet.ciiva.com/1039/l0075s0097lqm18f-1039419.pdf?src-supplier=Digi-Key; ComponentLink6URL: https://datasheet.ciiva.com/8510/l0075s0097lqm18f-8510087.pdf?src-supplier=Avnet; ComponentLink6Description: https://datasheet.ciiva.com/8510/l0075s0097lqm18f-8510087.pdf?src-supplier=Avnet; LCSC Part Number: C86083
footprint IND-0603 (1608 Metric) (0.063" L x 0.032" W (1.60mm x 0.80mm))
pins: 1, 2